# Altium footprint library Amin-Library.PcbLib: 601 footprints (part 34 of 38)
Each footprint in its own frame and in the unit in brackets; x right, y up, seen from the top. Pads: shape width x height; smd on the part's side, far side on the other; paste and mask are expansions set on the pad; w line width, h text height; cw(c..) or ccw(c..) is an arc to the next point about the centre after c.
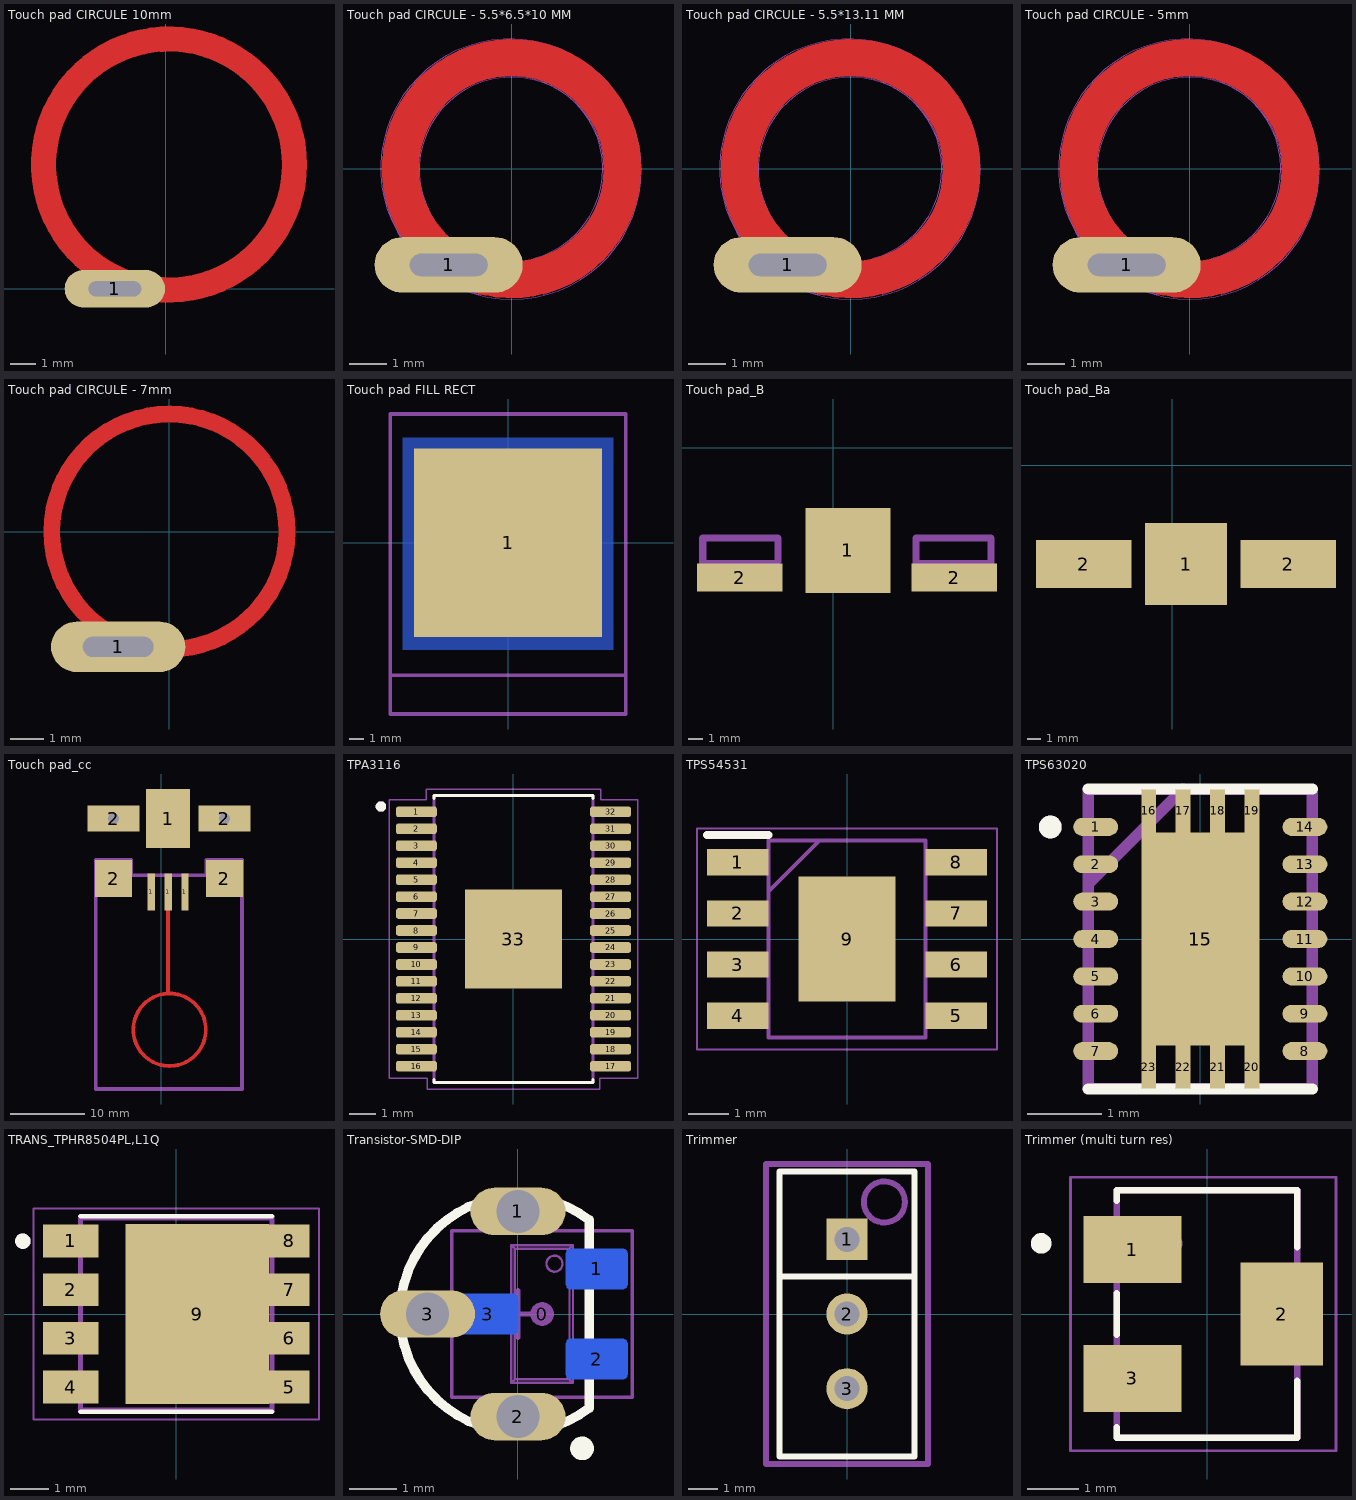
[diagram p33: the footprints below, top view; thin cyan lines are the x and y axes]

## Touch pad CIRCULE 10mm [mm]
pads (1):
  oval 4x1.5 hole 0.6 slot 2.1 at 0 deg: 1(-2.032,0)
Top Layer:
  circle w1: c0.127,4.953 r5
Top Solder:
  circle w1: c0.127,4.953 r5

## Touch pad CIRCULE - 5.5*6.5*10 MM [mm]
pads (1):
  oval 4x1.5 hole 0.6 slot 2.1 at 0 deg: 1(-1.7,-2.6)
Top Layer:
  circle w1: c0,0 r3
Top Solder:
  circle w1: c0,0 r3
Mechanical 1:
  circle w0.013: c0.005,-0.031 r2.5
  circle w0.013: c0.005,-0.031 r3.5
Top Courtyard:
  lines w0.013: -0.853,-3.403 cw(c-0.036,0) 0.85,-3.386 0.603,-2.417 ccw(c-0.036,0) -0.516,-2.453 -0.853,-3.403
3D body "tms1-sgp1.stp": height 7, standoff -2, extent -4.897,-5.162 5.207,4.699

## Touch pad CIRCULE - 5.5*13.11 MM [mm]
pads (1):
  oval 4x1.5 hole 0.6 slot 2.1 at 0 deg: 1(-1.7,-2.6)
Top Layer:
  circle w1: c0,0 r3
Top Solder:
  circle w1: c0,0 r3
Mechanical 1:
  circle w0.013: c0.005,-0.031 r2.5
  circle w0.013: c0.005,-0.031 r3.5
Top Courtyard:
  lines w0.013: -0.853,-3.403 cw(c-0.036,0) 0.85,-3.386 0.603,-2.417 ccw(c-0.036,0) -0.516,-2.453 -0.853,-3.403
3D body "fanar es 5.5.13.11.stp": height 12.75, standoff -2.25, extent -5.766,-5.222 5.334,5.476

## Touch pad CIRCULE - 5mm [mm]
pads (1):
  oval 4x1.5 hole 0.6 slot 2.1 at 0 deg: 1(-1.7,-2.6)
Top Layer:
  circle w1: c0,0 r3
Top Solder:
  circle w1: c0,0 r3
Mechanical 1:
  circle w0.013: c0.005,-0.031 r2.5
  circle w0.013: c0.005,-0.031 r3.5
Top Courtyard:
  lines w0.013: -0.853,-3.403 cw(c-0.036,0) 0.85,-3.386 0.603,-2.417 ccw(c-0.036,0) -0.516,-2.453 -0.853,-3.403
3D body "fanar.stp": height 17.33, standoff -2.46, extent -6.099,-6.337 5.75,5.935

## Touch pad CIRCULE - 7mm [mm]
pads (1):
  oval 4x1.5 hole 0.6 slot 2.1 at 0 deg: 1(-1.524,-3.429)
Top Layer:
  circle w0.5: c0,0 r3.5
Top Solder:
  circle w0.5: c0,0 r3.5

## Touch pad FILL RECT [mm]
pads (1):
  rect 13x13 smd paste-13: 1(0,0)
Bottom Layer:
  pour cut-out: 7.265,-7.366 -7.265,-7.366 -7.265,7.239 7.265,7.239
Top Courtyard:
  lines w0.254: -8.128,-9.144 -8.128,-11.811 8.128,-11.811 8.128,-9.144 ; -8.128,-9.144 8.128,-9.144 ; -8.128,-9.144 -8.128,8.89 8.128,8.89 8.128,-9.144
3D body: height 2, standoff 0.1, extent -8.128,-9.144 8.128,8.89
3D body: height 2, standoff 1.5, extent -8.128,-11.811 8.128,-9.144
3D body: height 2, standoff 0.1, extent -8.128,-11.811 -7.62,-9.144
3D body: height 2, standoff 0.1, extent 7.62,-11.811 8.128,-9.144
3D body: height 2, standoff 0.1, extent -7.62,-11.811 7.62,-11.43

## Touch pad_B [mm]
pads (3):
  rect 6x6 smd: 1(1.016,-7.239)
  rect 6x2 all layers, no hole: 2(-6.604,-9.144) 2(8.509,-9.144)
Mechanical 1:
  lines w0.5: 11.1,-6.35 11.1,-8.15 5.8,-8.15 5.8,-6.35 11.1,-6.35 ; 11.1,-6.35 11.1,-6.35 ; -9.2,-8.15 -4.056,-8.15 -3.9,-7.994 -3.9,-6.35 -9.2,-6.35 -9.2,-8.15

## Touch pad_Ba [mm]
pads (3):
  rect 6x6 smd: 1(1.016,-7.239)
  rect 7x3.5 all layers, no hole: 2(-6.477,-7.239) 2(8.509,-7.239)
Mechanical 1:
  lines w0.5: -9.056,-8.15 -9.056,-6.35 -4.056,-6.35 -4.056,-8.15 -9.056,-8.15 ; 5.944,-8.15 5.944,-6.35 10.944,-6.35 10.944,-8.15 5.944,-8.15

## Touch pad_cc [mm]
pads (8):
  rect 1x5 smd: 1(-1.397,-17.145) 1(0.889,-17.145) 1(3.175,-17.145)
  rect 6x8 smd: 1(0.889,-7.239)
  rect 5x5 smd: 2(-6.477,-15.367) 2(8.509,-15.367)
  rect 7x3.5 hole 1.5 square: 2(-6.477,-7.239) 2(8.509,-7.239)
Top Layer:
  circle w0.5: c1.089,-35.789 r4.902
  lines w0.5: 0.889,-30.861 0.889,-15.24
Mechanical 1:
  lines w0.5: -9.056,-8.15 -9.056,-6.35 -4.056,-6.35 -4.056,-8.15 -9.056,-8.15 ; -8.903,-43.805 10.897,-43.805 10.897,-12.805 6.097,-12.805 6.097,-14.905 -4.103,-14.905 -4.103,-12.805 -8.903,-12.805 -8.903,-43.805 ; 5.944,-8.15 5.944,-6.35 10.944,-6.35 10.944,-8.15 5.944,-8.15

## TPA3116 [mm]
pads (33):
  rrect50% 1.57x0.41 smd: 1(-3.72,4.875) 2(-3.72,4.225) 3(-3.72,3.575) 4(-3.72,2.925) 5(-3.72,2.275) 6(-3.72,1.625) 7(-3.72,0.975) 8(-3.72,0.325) 9(-3.72,-0.325) 10(-3.72,-0.975) 11(-3.72,-1.625) 12(-3.72,-2.275) 13(-3.72,-2.925) 14(-3.72,-3.575) 15(-3.72,-4.225) 16(-3.72,-4.875) 17(3.72,-4.875) 18(3.72,-4.225) 19(3.72,-3.575) 20(3.72,-2.925) 21(3.72,-2.275) 22(3.72,-1.625) 23(3.72,-0.975) 24(3.72,-0.325) 25(3.72,0.325) 26(3.72,0.975) 27(3.72,1.625) 28(3.72,2.275) 29(3.72,2.925) 30(3.72,3.575) 31(3.72,4.225) 32(3.72,4.875)
  rect 3.71x3.81 smd paste-3: 33(0,0)
Top Overlay:
  circle w0.2: c-5.08,5.08 r0.1
  lines w0.127: -3.05,-5.4 -3.05,-5.5 3.05,-5.5 3.05,-5.4 ; -3.05,5.4 -3.05,5.5 3.05,5.5 3.05,5.4
Top Paste:
  region: 1.485,-1.535 0.185,-1.535 0.185,-0.185 1.485,-0.185
  region: -0.185,-1.535 -1.485,-1.535 -1.485,-0.185 -0.185,-0.185
  region: -0.185,0.185 -1.485,0.185 -1.485,1.535 -0.185,1.535
  region: 1.485,0.185 0.185,0.185 0.185,1.535 1.485,1.535
Mechanical 13:
  circle w0.2: c-5.08,5.08 r0.1
  lines w0: -3.099,-5.029 -3.099,-4.724 ; -3.099,-4.369 -3.099,-4.064 ; -3.099,-3.734 -3.099,-3.429 ; -3.099,-3.073 -3.099,-2.769 ; -3.099,-2.413 -3.099,-2.134 ; -3.099,-1.778 -3.099,-1.473 ; -3.099,-1.118 -3.099,-0.813 ; -3.099,-0.483 -3.099,-0.178 ; -3.099,0.178 -3.099,0.483 ; -3.099,0.813 -3.099,1.118 ; -3.099,1.473 -3.099,1.778 ; -3.099,2.134 -3.099,2.413 ; -3.099,2.769 -3.099,3.073 ; -3.099,3.429 -3.099,3.734 ; -3.099,4.064 -3.099,4.369 ; -3.099,4.724 -3.099,5.029 ; 3.099,-5.029 3.099,-4.724 ; 3.099,-4.369 3.099,-4.064 ; 3.099,-3.734 3.099,-3.429 ; 3.099,-3.073 3.099,-2.769 ; 3.099,-2.413 3.099,-2.134 ; 3.099,-1.778 3.099,-1.473 ; 3.099,-1.118 3.099,-0.813 ; 3.099,-0.483 3.099,-0.178 ; 3.099,0.178 3.099,0.483 ; 3.099,0.813 3.099,1.118 ; 3.099,1.473 3.099,1.778 ; 3.099,2.134 3.099,2.413 ; 3.099,2.769 3.099,3.073 ; 3.099,3.429 3.099,3.734 ; 3.099,4.064 3.099,4.369 ; 3.099,4.724 3.099,5.029
  lines w0.127: -3.05,-5.5 -3.05,5.5 3.05,5.5 3.05,-5.5 -3.05,-5.5
Mechanical 15:
  lines w0.05: -4.76,-5.33 -4.76,5.33 -3.35,5.33 -3.35,5.75 3.35,5.75 3.35,5.33 4.76,5.33 4.76,-5.33 3.3,-5.33 3.3,-5.75 -3.3,-5.75 -3.3,-5.33 -4.76,-5.33
3D body "TPA3116D2QDADRQ1.STEP": height 1.2, standoff 0, extent -4.05,-5.5 4.05,5.5

## TPS54531 [mm]
pads (9):
  rect 1.525x0.65 smd: 1(-2.712,1.905) 2(-2.712,0.635) 3(-2.712,-0.635) 4(-2.712,-1.905) 5(2.712,-1.905) 6(2.712,-0.635) 7(2.712,0.635) 8(2.712,1.905)
  rect 2.4x3.1 smd: 9(0,0)
Top Overlay:
  lines w0.2: -3.475,2.58 -1.95,2.58
Mechanical 15:
  lines w0.1: -1.95,1.18 -0.68,2.45 ; -1.95,-2.45 -1.95,2.45 1.95,2.45 1.95,-2.45 -1.95,-2.45
Mechanical 20:
  lines w0.05: -3.725,-2.75 -3.725,2.75 3.725,2.75 3.725,-2.75 -3.725,-2.75
3D body "TPS54531DDAR.stp": height 1.57, standoff 0, extent -3,-2.45 3,2.45

## TPS63020 [mm]
pads (23):
  oval 0.6x0.24 smd: 1(-1.4,1.5) 2(-1.4,1) 3(-1.4,0.5) 4(-1.4,0) 5(-1.4,-0.5) 6(-1.4,-1) 7(-1.4,-1.5) 8(1.4,-1.5) 9(1.4,-1) 10(1.4,-0.5) 11(1.4,0) 12(1.4,0.5) 13(1.4,1) 14(1.4,1.5)
  rect 1.58x2.85 smd: 15(0,0)
  rect 0.2x0.575 smd: 16(-0.69,1.713) 17(-0.23,1.713) 18(0.23,1.713) 19(0.69,1.713) 20(0.69,-1.713) 21(0.23,-1.713) 22(-0.23,-1.713) 23(-0.69,-1.713)
Top Overlay:
  lines w0.152: -1.499,-2.007 1.499,-2.007 ; -1.499,2.007 1.499,2.007 ; -2.083,1.499 ccw(c-2.007,1.499) -1.93,1.499 ccw(c-2.007,1.499) -2.083,1.499
Top Paste:
  region: 0.12,-0.12 0.78,-0.12 0.78,-1.372 0.12,-1.372
  region: 0.12,1.37 0.78,1.37 0.78,0.12 0.12,0.12
  region: -0.781,1.37 -0.12,1.37 -0.12,0.12 -0.781,0.12
  region: -0.78,-0.12 -0.12,-0.12 -0.12,-1.37 -0.78,-1.37
Mechanical 4:
  lines w0.152: -2.083,1.499 ccw(c-2.007,1.499) -1.93,1.499 ; -2.083,1.499 cw(c-2.007,1.499) -1.93,1.499 ; -2.083,1.499 ccw(c-2.007,1.499) -1.93,1.499 ; -2.083,1.499 cw(c-2.007,1.499) -1.93,1.499 ; -1.5,-2 1.5,-2 ; -1.5,-2 -1.5,2 ; -1.5,-2 1.5,-2 ; -1.5,-2 -1.5,2 ; -1.5,2 1.5,2 ; -1.5,2 1.5,2 ; 1.5,-2 1.5,2 ; 1.5,-2 1.5,2 ; -1.499,0.737 -0.229,2.007 -1.499,0.737
3D body "User Library-VSON-14-1.step": height 1.06, standoff 0.01, extent -1.588,-2.084 1.622,2.126

## TRANS_TPHR8504PL,L1Q [mm]
pads (9):
  rect 1.45x0.85 smd: 1(-2.75,1.905) 2(-2.75,0.635) 3(-2.75,-0.635) 4(-2.75,-1.905)
  rect 1.05x0.85 smd: 5(2.95,-1.905) 6(2.95,-0.635) 7(2.95,0.635) 8(2.95,1.905)
  rect 3.75x4.7 smd paste-3: 9(0.55,0)
Top Overlay:
  circle w0.2: c-4,1.9 r0.1
  lines w0.127: -2.5,-2.55 2.5,-2.55 ; -2.5,2.55 2.5,2.55
Top Paste:
  region: 2.04,-1.186 -0.94,-1.186 -0.94,1.186 2.04,1.186
Mechanical 13:
  circle w0.2: c-4,1.9 r0.1
  lines w0.127: -2.5,-2.5 -2.5,2.5 2.5,2.5 2.5,-2.5 -2.5,-2.5
Mechanical 15:
  lines w0.05: -3.725,-2.75 -3.725,2.75 3.725,2.75 3.725,-2.75 -3.725,-2.75
3D body "TPHR8504PL,L1Q.STEP": height 1.01, standoff 0.01, extent -2.921,-2.633 3.079,2.667

## Transistor-SMD-DIP [mm]
pads (7):
  round 0.5 on Mech15: 0(0.508,0)
  oval 2x1 hole 0.9: 1(0,2.159) 2(0,-2.159) 3(-1.905,0)
  rrect25% 1.3x0.85 smd far side: 1(1.658,0.95) 2(1.658,-0.95) 3(-0.642,0)
Top Overlay:
  circle w0.25: c1.35,-2.83 r0.125
  lines w0.2: 1.5,-1.98 cw(c0,0) 1.5,1.98 1.5,-1.98
Bottom Overlay:
  lines w0.127: 0.127,-1.45 0.889,-1.45 0.889,1.45 0.127,1.45 0.127,-1.45
  text "." at 2.633,0.95 h1.4
Mechanical 13:
  circle w0.05: c0.768,1.06 r0.169
  lines w0.05: -0.682,-0.24 -0.682,0.24 ; -0.591,-0.24 -0.591,0.24 ; -0.566,-0.24 -0.566,0.24 ; -0.317,-0.24 -0.317,0.24 ; -0.142,-0.24 -0.892,-0.24 -0.892,0.24 -0.142,0.24 ; 1.158,-1.19 1.908,-1.19 1.908,-0.71 1.158,-0.71 ; 1.158,0.71 1.908,0.71 1.908,1.19 1.158,1.19 ; 1.333,-1.19 1.333,-0.71 ; 1.333,0.71 1.333,1.19 ; 1.582,-1.19 1.582,-0.71 ; 1.582,0.71 1.582,1.19 ; 1.607,-1.19 1.607,-0.71 ; 1.607,0.71 1.607,1.19 ; 1.698,-1.19 1.698,-0.71 ; 1.698,0.71 1.698,1.19 ; -0.142,-1.45 1.158,-1.45 ; -0.142,-1.45 -0.068,-1.376 ; -0.142,-1.45 -0.142,1.45 ; -0.142,1.45 -0.068,1.376 ; -0.142,1.45 1.158,1.45 ; -0.068,-1.376 1.084,-1.376 ; -0.068,-1.376 -0.068,1.376 ; -0.068,1.376 1.084,1.376 ; 1.084,-1.376 1.158,-1.45 ; 1.084,-1.376 1.084,1.376 ; 1.084,1.376 1.158,1.45 ; 1.158,-1.45 1.158,1.45
  lines w0.1: 1.5,-1.98 cw(c0,0) 1.5,1.98 1.5,-1.98
Mechanical 15:
  lines w0.076: -1.392,-1.75 2.408,-1.75 2.408,1.75 -1.392,1.75 -1.392,-1.75
  lines w0.1: -0.5,0 0.5,0 ; 0,-0.5 0,0.5
3D body: height 6.86, standoff 2.2, extent -2.485,-2.495 1.501,2.495
3D body "SOT23-3.STEP": height 1.29, standoff -0.01, extent -0.892,-1.45 1.908,1.45

## Trimmer [mm]
pads (3):
  rect 1.4x1.4 hole 0.85: 1(0,2.54)
  round 1.4 hole 0.85: 2(0,0) 3(0,-2.54)
Top Overlay:
  lines w0.2: -2.3,1.27 2.3,1.27 ; -2.3,1.27 -2.3,4.85 2.3,4.85 2.3,1.27 ; -2.3,1.27 -2.3,-4.85 2.3,-4.85 2.3,1.27
Mechanical 4:
  circle w0.2: c1.27,3.81 r0.7
  circle w0.2: c1.27,3.81 r0.7
Mechanical 16:
  lines w0.2: -2.75,-5.1 -2.75,5.1 2.75,5.1 2.75,-5.1 -2.75,-5.1
3D body "User Library-3296_Bourns.step": height 11.56, standoff -7.61, extent -2.415,-4.765 2.415,4.765

## Trimmer (multi turn res) [mm]
pads (3):
  rect 1.9x1.3 smd: 1(-1.45,1.25) 3(-1.45,-1.25)
  rect 1.6x2 smd: 2(1.45,0)
Top Overlay:
  circle w0.2: c-3.22,1.37 r0.1
  lines w0.127: -1.75,-2.2 -1.75,-2.4 1.75,-2.4 1.75,-1.3 ; -1.75,-0.4 -1.75,0.4 ; -1.75,2.2 -1.75,2.4 1.75,2.4 1.75,1.3
Mechanical 4:
  circle w0.2: c-0.68,1.37 r0.1
  circle w0.2: c-0.68,1.37 r0.1
  lines w0.127: -1.75,-2.4 1.75,-2.4 ; -1.75,-2.4 -1.75,2.4 ; -1.75,-2.4 1.75,-2.4 ; -1.75,-2.4 -1.75,2.4 ; -1.75,2.4 1.75,2.4 ; -1.75,2.4 1.75,2.4 ; 1.75,-2.4 1.75,2.4 ; 1.75,-2.4 1.75,2.4
Mechanical 16:
  lines w0.05: -2.65,-2.65 -2.65,2.65 2.5,2.65 2.5,-2.65 -2.65,-2.65
3D body "User Library-SM-4EW.step": height 5.32, standoff 0.01, extent -1.86,-2.559 1.86,2.56